# Altium footprint library QD4_2SET_38.PcbLib: 1 footprints
Each footprint in its own frame and in the unit in brackets; x right, y up, seen from the top. Pads: shape width x height; smd on the part's side, far side on the other; paste and mask are expansions set on the pad; w line width, h text height; cw(c..) or ccw(c..) is an arc to the next point about the centre after c.
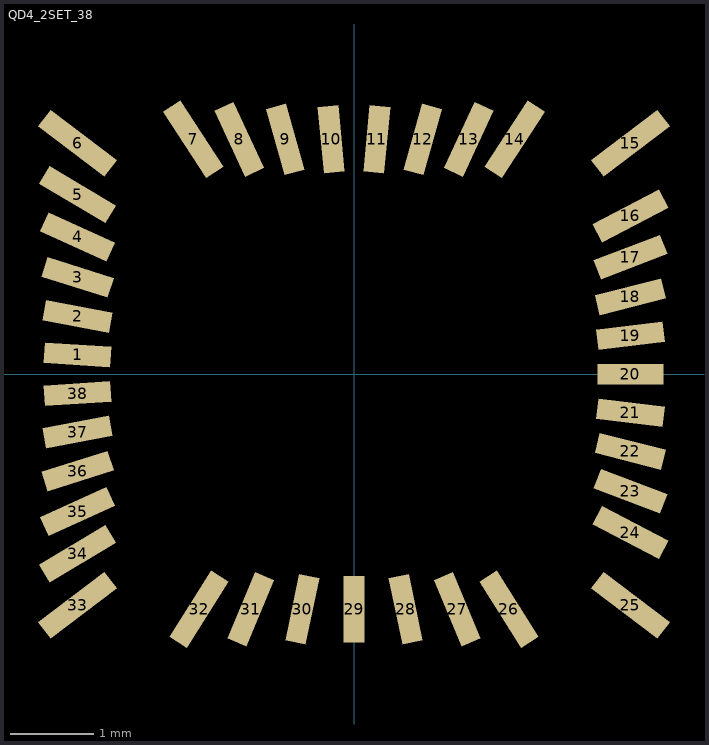
[diagram p0: the footprint, top view; thin cyan lines are the x and y axes]

## QD4_2SET_38 [mm] "QD4_2SET; 0.80 x 0.25 mm wire-parallel lands"
pads (38):
  rect 0.802x0.25 smd rot 176.38: 1(-3.33,0.233)
  rect 0.814x0.25 smd rot 169.35: 2(-3.33,0.696)
  rect 0.839x0.25 smd rot 162.43: 3(-3.33,1.167)
  rect 0.878x0.25 smd rot 155.67: 4(-3.33,1.654)
  rect 0.932x0.25 smd rot 149.13: 5(-3.33,2.164)
  rect 1.005x0.25 smd rot 142.74: 6(-3.33,2.783) 25(3.33,-2.783)
  rect 0.955x0.25 smd rot 123.11: 7(-1.936,2.83)
  rect 0.883x0.25 smd rot 114.98: 8(-1.383,2.83)
  rect 0.831x0.25 smd rot 105.61: 9(-0.83,2.83)
  rect 0.803x0.25 smd rot 95.32: 10(-0.277,2.83)
  rect 0.803x0.25 smd rot 84.68: 11(0.277,2.83)
  rect 0.831x0.25 smd rot 74.39: 12(0.83,2.83)
  rect 0.883x0.25 smd rot 65.02: 13(1.383,2.83)
  rect 0.955x0.25 smd rot 56.89: 14(1.936,2.83)
  rect 1.005x0.25 smd rot 37.26: 15(3.33,2.783) 33(-3.33,-2.783)
  rect 0.903x0.25 smd rot 27.67: 16(3.33,1.908)
  rect 0.857x0.25 smd rot 21.01: 17(3.33,1.41)
  rect 0.825x0.25 smd rot 14.14: 18(3.33,0.931)
  rect 0.806x0.25 smd rot 7.14: 19(3.33,0.464)
  rect 0.8x0.25 smd: 20(3.33,0)
  rect 0.806x0.25 smd rot 172.86: 21(3.33,-0.464)
  rect 0.825x0.25 smd rot 165.86: 22(3.33,-0.931)
  rect 0.857x0.25 smd rot 158.99: 23(3.33,-1.41)
  rect 0.903x0.25 smd rot 152.33: 24(3.33,-1.908)
  rect 0.945x0.25 smd rot 122.16: 26(1.867,-2.83)
  rect 0.867x0.25 smd rot 112.74: 27(1.244,-2.83)
  rect 0.817x0.25 smd rot 101.84: 28(0.622,-2.83)
  rect 0.25x0.8 smd: 29(0,-2.83)
  rect 0.817x0.25 smd rot 78.16: 30(-0.622,-2.83)
  rect 0.867x0.25 smd rot 67.26: 31(-1.244,-2.83)
  rect 0.945x0.25 smd rot 57.84: 32(-1.867,-2.83)
  rect 0.932x0.25 smd rot 30.87: 34(-3.33,-2.164)
  rect 0.878x0.25 smd rot 24.33: 35(-3.33,-1.654)
  rect 0.839x0.25 smd rot 17.57: 36(-3.33,-1.167)
  rect 0.814x0.25 smd rot 10.65: 37(-3.33,-0.696)
  rect 0.802x0.25 smd rot 3.62: 38(-3.33,-0.233)